# Altium footprint library Batterie_footprint.PcbLib: 67 footprints (part 2 of 5)
Each footprint in its own frame and in the unit in brackets; x right, y up, seen from the top. Pads: shape width x height; smd on the part's side, far side on the other; paste and mask are expansions set on the pad; w line width, h text height; cw(c..) or ccw(c..) is an arc to the next point about the centre after c.
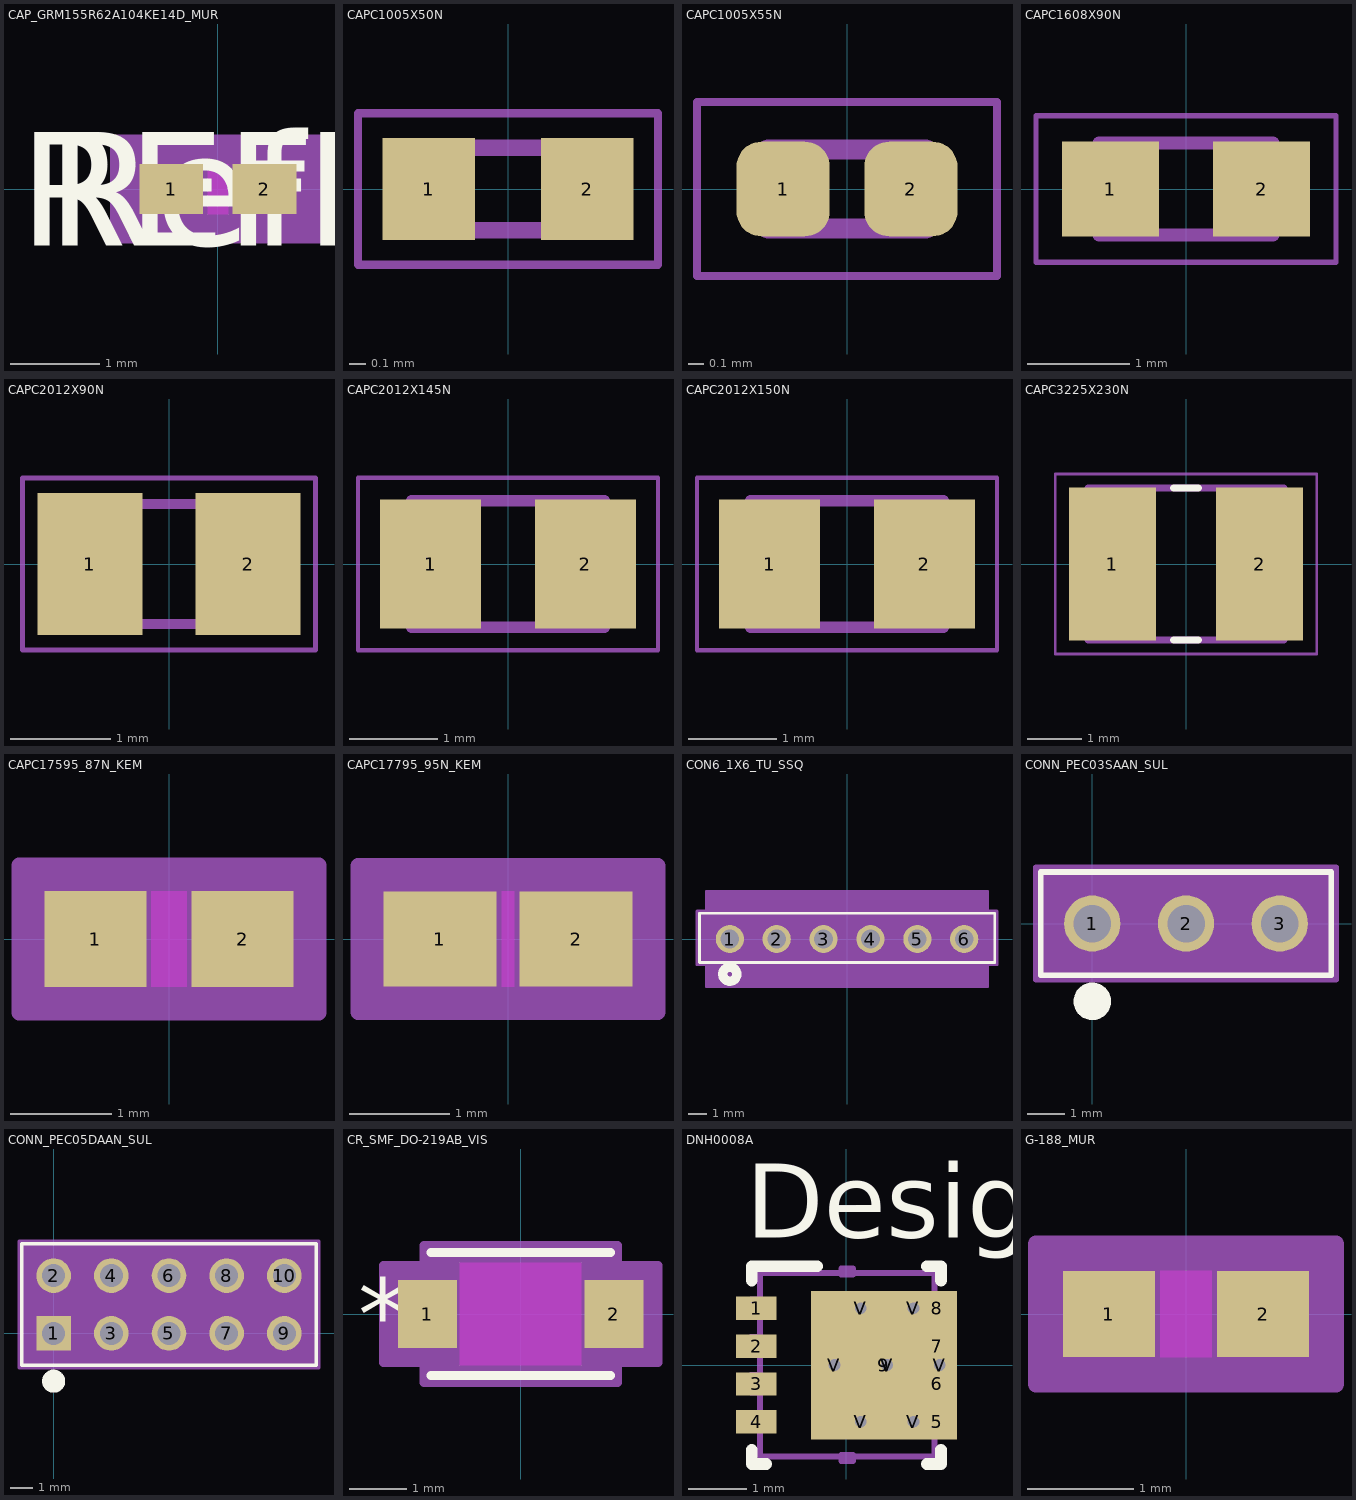
[diagram p1: the footprints below, top view; thin cyan lines are the x and y axes]

## CAP_GRM155R62A104KE14D_MUR [mil]
pads (2):
  rect 28x22 smd paste+0 mask+0: 1(-20.5,0) 2(20.5,0)
Top Layer keep-out:
  region: -4.5,-9 -4.5,9 4.5,9 4.5,-9
Top Overlay:
  text "RefDes" at -75,-25 h50
  text "REFDES" at -87.5,-25 h50
Keep-Out Layer:
  region: -4.5,-11 -4.5,11 4.5,11 4.5,-11
Mechanical 13:
  lines w1: -20.5,-11 -20.5,11 ; -20.5,-11 -6.5,-11 -6.5,11 -20.5,11 ; -20.5,-11 20.5,-11 ; -20.5,-11 -20.5,11 ; -20.5,11 20.5,11 ; 20.5,-11 6.5,-11 6.5,11 20.5,11 ; 20.5,-11 20.5,11 ; 20.5,-11 20.5,11
  text "RefDes2" at -87.5,-25 h50
Mechanical 15:
  region: 44.5,-21 -44.5,-21 -44.5,21 44.5,21
  lines w6: -44.5,-21 -44.5,21 44.5,21 44.5,-21 -44.5,-21
3D body "CAP_GRM155R62A104KE14D_MUR.step": height 22.01, standoff 0, extent -20.51,-10.98 20.51,10.98

## CAPC1005X50N [mm]
pads (2):
  rect 0.56x0.62 smd: 1(-0.48,0) 2(0.48,0)
Mechanical 15:
  lines w0.1: -0.5,-0.25 -0.5,0.25 0.5,0.25 0.5,-0.25 -0.5,-0.25
Mechanical 20:
  lines w0.05: -0.91,-0.46 -0.91,0.46 0.91,0.46 0.91,-0.46 -0.91,-0.46

## CAPC1005X55N [mm]
height 0.55
pads (2):
  rrect53% 0.59x0.6 smd: 1(-0.405,0) 2(0.405,0)
Mechanical 13:
  lines w0.127: -0.5,-0.25 0.5,-0.25 0.5,0.25 -0.5,0.25 -0.5,-0.25
Mechanical 15:
  lines w0.05: -0.95,-0.55 0.95,-0.55 0.95,0.55 -0.95,0.55 -0.95,-0.55
3D body "step_temp.STEP": height 0.55, standoff 0, extent -0.5,-0.25 0.5,0.25

## CAPC1608X90N [mm]
pads (2):
  rect 0.95x0.93 smd paste+0 mask+0.102: 1(-0.738,0) 2(0.738,0)
Mechanical 13:
  lines w0.127: -0.85,-0.45 -0.85,0.45 0.85,0.45 0.85,-0.45 -0.85,-0.45
Mechanical 15:
  lines w0.05: -1.465,-0.715 -1.465,0.715 1.465,0.715 1.465,-0.715 -1.465,-0.715
3D body "step_temp.STEP": height 0.9, standoff 0, extent -0.8,-0.4 0.8,0.4

## CAPC2012X90N [mm]
pads (2):
  rect 1.05x1.42 smd: 1(-0.79,0) 2(0.79,0)
Mechanical 15:
  lines w0.1: -1,-0.6 -1,0.6 1,0.6 1,-0.6 -1,-0.6
Mechanical 20:
  lines w0.05: -1.465,-0.86 -1.465,0.86 1.465,0.86 1.465,-0.86 -1.465,-0.86

## CAPC2012X145N [mm]
pads (2):
  rect 1.15x1.47 smd: 1(-0.88,0) 2(0.88,0)
Mechanical 13:
  lines w0.127: -1.1,-0.72 1.1,-0.72 1.1,0.72 -1.1,0.72 -1.1,-0.72
Mechanical 15:
  lines w0.05: -1.708,-0.983 1.708,-0.983 1.708,0.983 -1.708,0.983 -1.708,-0.983

## CAPC2012X150N [mm]
pads (2):
  rect 1.15x1.47 smd: 1(-0.88,0) 2(0.88,0)
Mechanical 13:
  lines w0.127: -1.1,-0.72 -1.1,0.72 1.1,0.72 1.1,-0.72 -1.1,-0.72
Mechanical 15:
  lines w0.05: -1.708,-0.983 -1.708,0.983 1.708,0.983 1.708,-0.983 -1.708,-0.983
3D body "step_temp.STEP": height 1.5, standoff 0, extent -1,-0.625 1,0.625

## CAPC3225X230N [mm]
pads (2):
  rect 1.6x2.81 smd: 1(-1.353,0) 2(1.353,0)
Top Overlay:
  lines w0.127: -0.23,-1.4 0.23,-1.4 ; -0.23,1.4 0.23,1.4
Mechanical 13:
  lines w0.127: -1.8,-1.4 -1.8,1.4 1.8,1.4 1.8,-1.4 -1.8,-1.4
Mechanical 15:
  lines w0.05: -2.404,-1.655 -2.404,1.655 2.404,1.655 2.404,-1.655 -2.404,-1.655
3D body "step_temp.STEP": height 2.3, standoff 0, extent -1.6,-1.25 1.6,1.25

## CAPC17595_87N_KEM [mm]
pads (2):
  rect 1.006x0.95 smd paste+0 mask+0: 1(-0.728,0) 2(0.728,0)
Top Layer keep-out:
  region: -0.174,-0.424 -0.174,0.424 0.174,0.424 0.174,-0.424
Top Overlay:
  text ".Designator" at -3.492,-0.635 h1.27
Keep-Out Layer:
  region: -0.174,-0.475 -0.174,0.475 0.174,0.475 0.174,-0.475
Mechanical 13:
  lines w0.025: -0.875,-0.475 -0.875,0.475 ; -0.875,-0.475 -0.375,-0.475 -0.375,0.475 -0.875,0.475 ; -0.875,-0.475 0.875,-0.475 ; -0.875,-0.475 -0.875,0.475 ; -0.875,0.475 0.875,0.475 ; 0.875,-0.475 0.375,-0.475 0.375,0.475 0.875,0.475 ; 0.875,-0.475 0.875,0.475 ; 0.875,-0.475 0.875,0.475
  text ".Designator" at -3.492,-0.635 h1.27
Mechanical 15:
  region: 1.485,-0.729 -1.485,-0.729 -1.485,0.729 1.485,0.729
  lines w0.152: -1.485,-0.729 -1.485,0.729 1.485,0.729 1.485,-0.729 -1.485,-0.729
3D body "CAPC17595_87N_KEM.step": height 0.87, standoff 0, extent -0.875,-0.475 0.875,0.475

## CAPC17795_95N_KEM [mm]
pads (2):
  rect 1.126x0.95 smd paste+0 mask+0: 1(-0.678,0) 2(0.678,0)
Top Layer keep-out:
  region: -0.064,-0.424 -0.064,0.424 0.064,0.424 0.064,-0.424
Top Overlay:
  text ".Designator" at -3.492,-0.635 h1.27
Keep-Out Layer:
  region: -0.064,-0.475 -0.064,0.475 0.064,0.475 0.064,-0.475
Mechanical 13:
  lines w0.025: -0.885,-0.475 -0.885,0.475 ; -0.885,-0.475 0.885,-0.475 ; -0.885,-0.475 -0.285,-0.475 -0.285,0.475 -0.885,0.475 ; -0.885,-0.475 -0.885,0.475 ; -0.885,0.475 0.885,0.475 ; 0.885,-0.475 0.885,0.475 ; 0.885,-0.475 0.885,0.475 ; 0.885,-0.475 0.285,-0.475 0.285,0.475 0.885,0.475
  text ".Designator" at -3.492,-0.635 h1.27
Mechanical 15:
  region: 1.495,-0.729 -1.495,-0.729 -1.495,0.729 1.495,0.729
  lines w0.152: -1.495,-0.729 1.495,-0.729 1.495,0.729 -1.495,0.729 -1.495,-0.729
3D body "CAPC17795_95N_KEM.step": height 0.95, standoff 0, extent -0.885,-0.475 0.885,0.475

## CON6_1X6_TU_SSQ [mil]
pads (6):
  round 60 hole 40 paste-99999 mask-30: 1(-250,0) 2(-150,0) 3(-50,0) 4(50,0) 5(150,0) 6(250,0)
Top Overlay:
  circle w20: c-250,-75 r15
  lines w6: -315,-50 -315,55 315,55 315,-50 -315,-50
  text ".Designator" at -137.5,-25 h50
Bottom Overlay:
  circle w20: c-250,-75 r15
Mechanical 13:
  circle w1: c-250,0 r10
  lines w1: -310,-45 -310,50 310,50 310,-45 -310,-45
  text ".Designator" at -137.5,-25 h50
Mechanical 15:
  region: 320,60 300,60 300,102 -300,102 -300,60 -320,60 -320,-55 -300,-55 -300,-102 300,-102 300,-55 320,-55
  lines w6: -320,-55 -300,-55 -300,-102 300,-102 300,-55 320,-55 320,60 300,60 300,102 -300,102 -300,60 -320,60 -320,-55

## CONN_PEC03SAAN_SUL [mil]
pads (3):
  round 60 hole 40 paste-99999 mask+0: 1(0,0) 2(100,0) 3(200,0)
Top Overlay:
  circle w20: c0,-83 r10
  lines w6: -55,-55 255,-55 255,55 -55,55 -55,-55
  text ".Designator" at -37.5,-25 h50
Mechanical 13:
  circle w1: c0,-35 r10
  lines w1: -50,-50 250,-50 250,50 -50,50 -50,-50
  text ".Designator" at -37.5,-25 h50
Mechanical 15:
  region: 260,60 -60,60 -60,-60 260,-60
  lines w6: -60,-60 -60,60 260,60 260,-60 -60,-60
3D body "CONN_PEC03SAAN_SUL.step": height 330, standoff -200, extent -50,-50 250,50

## CONN_PEC05DAAN_SUL [mil]
pads (10):
  rect 60x60 hole 40 paste-99999 mask+0: 1(0,0)
  round 60 hole 40 paste-99999 mask+0: 2(0,100) 3(100,0) 4(100,100) 5(200,0) 6(200,100) 7(300,0) 8(300,100) 9(400,0) 10(400,100)
Top Overlay:
  circle w20: c0,-83 r10
  lines w6: -55,-55 455,-55 455,155 -55,155 -55,-55
  text ".Designator" at 62.5,25 h50
Mechanical 13:
  circle w1: c0,-35 r10
  lines w1: -50,-50 450,-50 450,150 -50,150 -50,-50
  text ".Designator" at 62.5,25 h50
Mechanical 15:
  region: 460,160 -60,160 -60,-60 460,-60
  lines w6: -60,-60 -60,160 460,160 460,-60 -60,-60
3D body "CONN_PEC05DAAN_SUL.step": height 337.99, standoff -200, extent -50,-150 450,50

## CR_SMF_DO-219AB_VIS [mil]
pads (2):
  rect 40.87x47 smd paste+0 mask+0: 1(-64.44,0) 2(64.44,0)
Top Layer keep-out:
  region: -42,-35.5 -42,35.5 42,35.5 42,-35.5
Top Overlay:
  lines w6: -62,-42.5 62,-42.5 ; -62,42.5 62,42.5
  text ".Designator" at -137.5,-25 h50
  text "*" at -112.37,-25 h50
Keep-Out Layer:
  region: -42,-35.5 -42,35.5 42,35.5 42,-35.5
Mechanical 13:
  lines w1: -57,-18.75 -38.25,-37.5 ; -57,18.75 -38.25,37.5 ; -77,-23.5 -77,23.5 -57,23.5 -57,-23.5 -77,-23.5 ; -57,-37.5 57,-37.5 57,37.5 -57,37.5 -57,-37.5 ; 57,-23.5 57,23.5 77,23.5 77,-23.5 57,-23.5
  text "*" at -59.5,-25 h50
  text ".Designator" at -137.5,-25 h50
Mechanical 15:
  region: -67,-33.5 -94.87,-33.5 -94.87,33.5 -67,33.5 -67,47.5 67,47.5 67,33.5 94.87,33.5 94.87,-33.5 67,-33.5 67,-47.5 -67,-47.5
  lines w6: -94.87,-33.5 -94.87,33.5 -67,33.5 -67,47.5 67,47.5 67,33.5 94.87,33.5 94.87,-33.5 67,-33.5 67,-47.5 -67,-47.5 -67,-33.5 -94.87,-33.5
3D body "CR_SMF_DO-219AB_VIS.step": height 43.27, standoff 0, extent -77.01,-37.48 77.01,37.48

## DNH0008A [mm]
pads (16):
  rect 0.7x0.4 smd paste-0.05 mask-0.051: 1(-1.55,0.975) 2(-1.55,0.325) 3(-1.55,-0.325) 4(-1.55,-0.975) 5(1.55,-0.975) 6(1.55,-0.325) 7(1.55,0.325) 8(1.55,0.975)
  rect 2.51x2.55 smd paste-1.262 mask-1.257: 9(0.645,0)
  round 0.5 hole 0.203 paste-2539.97 mask+0: V(-0.208,0) V(0.245,-0.975) V(0.245,0.975) V(0.697,0) V(1.15,-0.975) V(1.15,0.975) V(1.602,0)
Top Overlay:
  lines w0.2: -1.625,-1.453 -1.625,-1.7 -1.378,-1.7 ; -1.625,1.453 -1.625,1.7 -0.5,1.7 ; 1.378,-1.7 1.625,-1.7 1.625,-1.453 ; 1.378,1.7 1.625,1.7 1.625,1.453
  text ".Designator" at -3.492,-0.635 h1.27
  text "Designator9" at -1.727,2.184 h1.27
Top Paste:
  region: 0.346,0.14 0.345,0.149 0.345,1.176 0.346,1.185 0.349,1.195 0.353,1.203 0.359,1.211 0.367,1.217 0.375,1.221 0.385,1.224 0.394,1.225 1.001,1.225 1.01,1.224 1.02,1.221 1.028,1.217 1.036,1.211 1.042,1.203 1.046,1.195 1.049,1.185 1.05,1.176 1.05,0.149 1.049,0.14 1.046,0.13 1.042,0.122 1.036,0.114 1.028,0.108 1.02,0.104 1.01,0.101 1.001,0.1 0.394,0.1 0.385,0.101 0.375,0.104 0.367,0.108 0.359,0.114 0.353,0.122 0.349,0.13
  region: 0.346,-1.185 0.345,-1.176 0.345,-0.149 0.346,-0.14 0.349,-0.13 0.353,-0.122 0.359,-0.114 0.367,-0.108 0.375,-0.104 0.385,-0.101 0.394,-0.1 1.001,-0.1 1.01,-0.101 1.02,-0.104 1.028,-0.108 1.036,-0.114 1.042,-0.122 1.046,-0.13 1.049,-0.14 1.05,-0.149 1.05,-1.176 1.049,-1.185 1.046,-1.195 1.042,-1.203 1.036,-1.211 1.028,-1.217 1.02,-1.221 1.01,-1.224 1.001,-1.225 0.394,-1.225 0.385,-1.224 0.375,-1.221 0.367,-1.217 0.359,-1.211 0.353,-1.203 0.349,-1.195
  region: 0.144,-0.14 0.145,-0.149 0.145,-1.176 0.144,-1.185 0.141,-1.195 0.137,-1.203 0.131,-1.211 0.123,-1.217 0.115,-1.221 0.105,-1.224 0.096,-1.225 -0.511,-1.225 -0.52,-1.224 -0.53,-1.221 -0.538,-1.217 -0.546,-1.211 -0.552,-1.203 -0.556,-1.195 -0.559,-1.185 -0.56,-1.176 -0.56,-0.149 -0.559,-0.14 -0.556,-0.13 -0.552,-0.122 -0.546,-0.114 -0.538,-0.108 -0.53,-0.104 -0.52,-0.101 -0.511,-0.1 0.096,-0.1 0.105,-0.101 0.115,-0.104 0.123,-0.108 0.131,-0.114 0.137,-0.122 0.141,-0.13
  region: 0.144,1.185 0.145,1.176 0.145,0.149 0.144,0.14 0.141,0.13 0.137,0.122 0.131,0.114 0.123,0.108 0.115,0.104 0.105,0.101 0.096,0.1 -0.511,0.1 -0.52,0.101 -0.53,0.104 -0.538,0.108 -0.546,0.114 -0.552,0.122 -0.556,0.13 -0.559,0.14 -0.56,0.149 -0.56,1.176 -0.559,1.185 -0.556,1.195 -0.552,1.203 -0.546,1.211 -0.538,1.217 -0.53,1.221 -0.52,1.224 -0.511,1.225 0.096,1.225 0.105,1.224 0.115,1.221 0.123,1.217 0.131,1.211 0.137,1.203 0.141,1.195
Top Solder:
  region: -0.559,-1.182 -0.56,-1.172 -0.56,1.172 -0.559,1.182 -0.556,1.192 -0.551,1.201 -0.544,1.209 -0.536,1.216 -0.527,1.221 -0.517,1.224 -0.507,1.225 1.162,1.225 1.172,1.224 1.182,1.221 1.191,1.216 1.199,1.209 1.206,1.201 1.211,1.192 1.214,1.182 1.215,1.172 1.215,-1.172 1.214,-1.182 1.211,-1.192 1.206,-1.201 1.199,-1.209 1.191,-1.216 1.182,-1.221 1.172,-1.224 1.162,-1.225 -0.507,-1.225 -0.517,-1.224 -0.527,-1.221 -0.536,-1.216 -0.544,-1.209 -0.551,-1.201 -0.556,-1.192
  region: 0.925,0.475 0.925,0.175 1.425,0.175 1.425,0.475
  region: 0.925,-0.175 0.925,-0.475 1.425,-0.475 1.425,-0.175
  region: 0.925,-0.825 0.925,-1.125 1.425,-1.125 1.425,-0.825
  region: 0.925,1.125 0.925,0.825 1.425,0.825 1.425,1.125
Mechanical 13:
  lines w0.1: -1.487,-1.119 -1.487,-1.569 -0.087,-1.569 ; -1.487,-0.819 -1.487,-0.469 ; -1.487,-0.169 -1.487,0.181 ; -1.487,0.481 -1.487,0.831 ; -1.487,1.131 -1.487,1.581 -0.087,1.581 ; 0.113,-1.569 1.513,-1.569 1.513,-1.119 ; 0.113,1.581 1.513,1.581 1.513,1.131 ; 1.513,-0.819 1.513,-0.469 ; 1.513,-0.169 1.513,0.181 ; 1.513,0.481 1.513,0.831 ; -1.637,-1.119 -1.637,-0.819 -1.461,-0.819 -1.461,-1.119 -1.637,-1.119 ; -1.637,-0.469 -1.637,-0.169 -1.461,-0.169 -1.461,-0.469 -1.637,-0.469 ; -1.637,0.181 -1.461,0.181 -1.461,0.481 -1.637,0.481 -1.637,0.181 ; -1.637,0.831 -1.637,1.131 -1.461,1.131 -1.461,0.831 -1.637,0.831 ; -0.087,-1.649 -0.087,-1.543 0.113,-1.543 0.113,-1.649 -0.087,-1.649 ; -0.087,1.554 0.113,1.554 0.113,1.661 -0.087,1.661 -0.087,1.554 ; 1.486,-1.119 1.486,-0.819 1.663,-0.819 1.663,-1.119 1.486,-1.119 ; 1.486,-0.469 1.486,-0.169 1.663,-0.169 1.663,-0.469 1.486,-0.469 ; 1.486,0.181 1.486,0.481 1.663,0.481 1.663,0.181 1.486,0.181 ; 1.486,0.831 1.486,1.131 1.663,1.131 1.663,0.831 1.486,0.831
  text ".Designator" at -3.492,-0.635 h1.27

## G-188_MUR [mil]
pads (2):
  rect 34x32 smd paste+0 mask+0: 1(-28.5,0) 2(28.5,0)
Top Layer keep-out:
  region: -9.5,-14 -9.5,14 9.5,14 9.5,-14
Top Overlay:
  text ".Designator" at -137.5,-25 h50
Keep-Out Layer:
  region: -9.5,-16 -9.5,16 9.5,16 9.5,-16
Mechanical 13:
  lines w1: -31.5,-16 -31.5,16 ; -31.5,-16 -11.5,-16 -11.5,16 -31.5,16 ; -31.5,-16 31.5,-16 ; -31.5,-16 -31.5,16 ; -31.5,16 31.5,16 ; 31.5,-16 11.5,-16 11.5,16 31.5,16 ; 31.5,-16 31.5,16 ; 31.5,-16 31.5,16
  text ".Designator" at -137.5,-25 h50
Mechanical 15:
  region: 55.5,-26 -55.5,-26 -55.5,26 55.5,26
  lines w6: -55.5,-26 -55.5,26 55.5,26 55.5,-26 -55.5,-26
3D body "G-188_MUR.step": height 35, standoff 0, extent -31.5,-15.98 31.5,15.98